# Altium integrated library CGA5L1X7R1V106K160AE.IntLib: 1 symbol
Pins are listed as number, name and electrical type; pins without a type are passive.

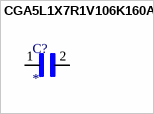
[diagram p0: symbol CGA5L1X7R1V106K160AE]

## CGA5L1X7R1V106K160AE
designator C?
10 ÂµF Â±10% 35V é™¶ç“·ç”µå®¹å™¨ X7R 1206ï¼ˆ3216 å…¬åˆ¶ï¼‰; MF: TDK; MP: CGA5L1X7R1V106K160AE; Package: 3216 TDK; Price: None; Check_prices: https://www.snapeda.com/parts/CGA5L1X7R1V106K160AE/TDK/view-part/?ref=eda; Value: *; SnapEDA_Link: https://www.snapeda.com/parts/CGA5L1X7R1V106K160AE/TDK/view-part/?ref=snap; Availability: In Stock; Purchase-URL: https://pricing.snapeda.com/search/part/CGA5L1X7R1V106K160AE/?ref=eda
footprint CAPC3216X190N
pins: 1, 2